# Altium footprint library KF301-5.0-2P.PcbLib: 1 footprints
Each footprint in its own frame and in the unit in brackets; x right, y up, seen from the top. Pads: shape width x height; smd on the part's side, far side on the other; paste and mask are expansions set on the pad; w line width, h text height; cw(c..) or ccw(c..) is an arc to the next point about the centre after c.
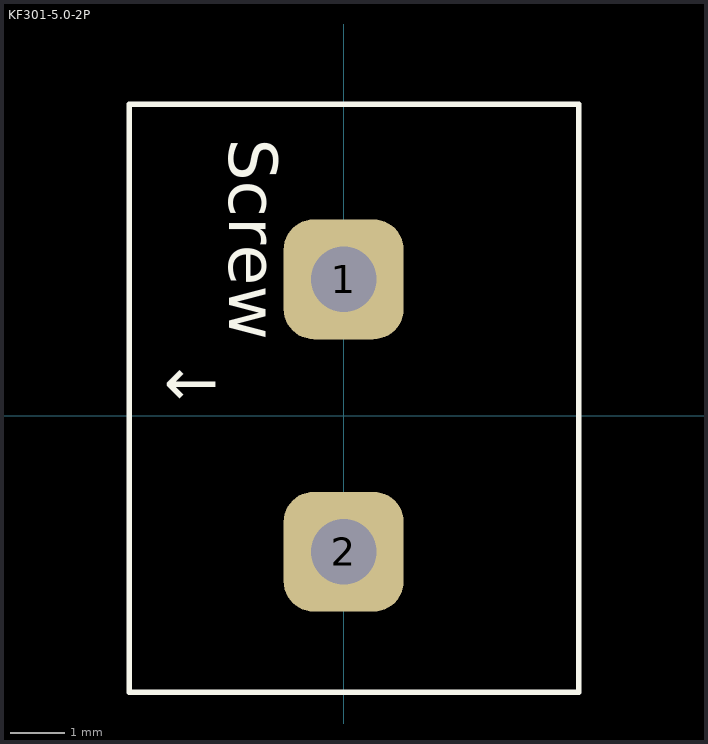
[diagram p0: the footprint, top view; thin cyan lines are the x and y axes]

## KF301-5.0-2P [mm] "Domino KF301-5.0-2P"
pads (2):
  rrect50% 2.2x2.2 hole 1.2: 1(0,2.5) 2(0,-2.5)
Top Overlay:
  lines w0.1: -3.937,-5.08 4.318,-5.08 4.318,5.715 -3.937,5.715 -3.937,-5.08
  text "←" at -3.302,-0.104 h1.52
  text "Screw" at -2.396,5.08 h1.52
3D body "KF301-2P--3DModel-STEP-510211.STEP": height 10.1, standoff -4.4, extent -3.25,-5 4.25,5.6